# Altium footprint library Amin-Library.PcbLib: 601 footprints (part 29 of 38)
Each footprint in its own frame and in the unit in brackets; x right, y up, seen from the top. Pads: shape width x height; smd on the part's side, far side on the other; paste and mask are expansions set on the pad; w line width, h text height; cw(c..) or ccw(c..) is an arc to the next point about the centre after c.
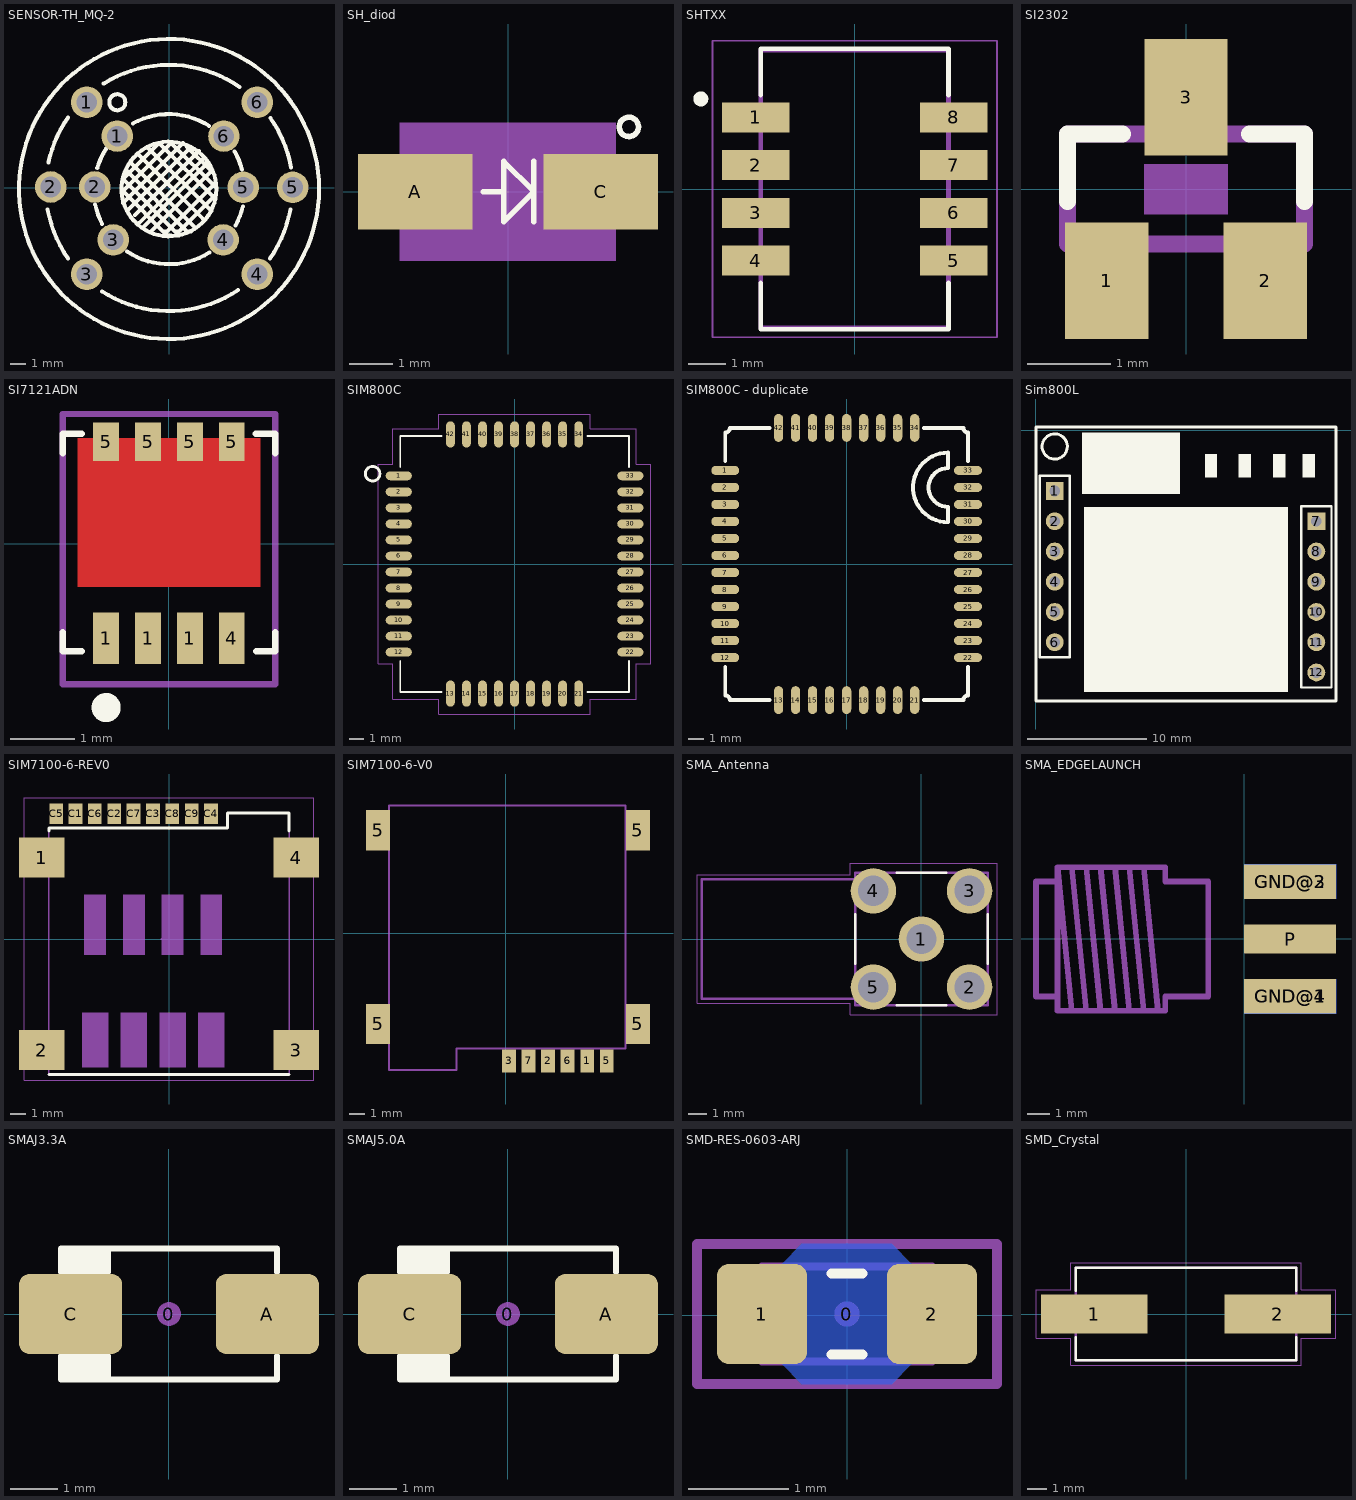
[diagram p28: the footprints below, top view; thin cyan lines are the x and y axes]

## SENSOR-TH_MQ-2 [mm]
pads (12):
  round 2 hole 1.3 paste-2539.97 mask+0.051: 1(-5.207,5.43) 1(-3.277,3.289) 2(-7.493,0.064) 2(-4.699,0.064) 3(-5.207,-5.461) 3(-3.531,-3.289) 4(3.429,-3.289) 4(5.588,-5.461) 5(4.699,0.038) 5(7.833,0.038) 6(3.48,3.289) 6(5.588,5.43)
Top Overlay:
  circle w0.254: c0,-0.064 r9.5
  circle w0.254: c-3.277,5.43 r0.508
  circle w0.254: c0,-0.064 r3
  lines w0.254: -7.682,-1.355 ccw(c0,0) -6.39,-4.474 ; -7.63,1.622 cw(c0,0) -6.39,4.474 ; -4.674,-1.041 ccw(c0,-0.063) -4.235,-2.269 ; -4.544,1.267 cw(c0,-0.064) -3.988,2.489 ; -4.248,-6.542 ccw(c0,0) 4.362,-6.466 ; -4.133,6.615 cw(c0,0) 4.474,6.389 ; -2.911,-0.963 0.899,2.847 ; -2.667,-4.013 ccw(c0,-0.063) 2.574,-4.074 ; -2.657,-1.471 1.407,2.593 ; -2.657,1.069 1.153,-2.741 1.407,-2.741 ; -2.403,1.577 1.661,-2.487 ; -2.276,4.093 cw(c0,-0.063) 2.54,3.937 ; -2.149,-1.725 1.915,2.339 ; -1.895,-2.233 2.169,1.831 ; -1.895,2.085 2.169,-1.979 ; -1.641,-2.487 2.423,1.577 ; -1.387,2.593 2.677,-1.471 ; -1.133,-2.741 2.677,1.069 1.153,2.593 ; -0.371,-2.741 -0.117,-2.741 2.931,0.307 ; 0.137,-2.995 -0.117,-2.995 -2.911,-0.201 0.137,2.847 2.931,0.053 ; 0.391,-2.741 0.645,-2.741 2.931,-0.455 ; 0.645,-2.995 -2.911,0.561 -0.625,2.847 2.931,-0.709 ; 4.161,2.297 cw(c0,-0.063) 4.623,1.168 ; 4.216,-2.362 ccw(c0,-0.063) 4.673,-1.17 ; 6.39,-4.474 ccw(c0,0) 7.682,-1.355 ; 6.43,4.421 cw(c0.041,-0.053) 7.722,1.301
3D body "User Library-MQ-5.step": height 31.06, standoff 8, extent -9.5,-9.551 9.5,9.424
3D body "User Library-socket-7.step": height 12.16, standoff -3.48, extent -8.363,-8.436 8.637,8.543

## SH_diod [mm]
pads (2):
  rect 2.65x1.75 smd: A(-2.15,0) C(2.15,0)
Top Overlay:
  circle w0.127: c2.8,1.5 r0.224
  lines w0.127: -0.573,0 -0.1,0 ; 0.6,-0.7 0.6,0 ; 0.6,0.7 0.6,0 ; -0.1,0 -0.1,-0.7 0.6,0 ; -0.1,0 -0.1,0.7 0.6,0
Mechanical 4:
  region: -0.501,0.9 0.5,0.9 0.5,-0.901 -0.501,-0.901
  region: -0.501,0.9 0.5,0.9 0.5,-0.901 -0.501,-0.901
  lines w0.127: -2.375,-1.475 -2.375,1.475 ; -2.375,-1.475 2.375,-1.475 ; -2.375,-1.475 -2.375,1.475 ; -2.375,-1.475 2.375,-1.475 ; -2.375,1.475 2.375,1.475 ; -2.375,1.475 2.375,1.475 ; 2.375,-1.475 2.375,1.475 ; 2.375,-1.475 2.375,1.475
Mechanical 16:
  region: -2.502,1.6 2.5,1.6 2.5,-1.601 -2.502,-1.601
3D body "User Library-DFLS220-POWERDI-123.step": height 1.16, standoff 0.01, extent -1.75,-0.89 2.15,0.89

## SHTXX [mm]
pads (8):
  rect 1.8x0.8 smd: 1(-2.64,1.905) 2(-2.64,0.635) 3(-2.64,-0.635) 4(-2.64,-1.905) 5(2.64,-1.905) 6(2.64,-0.635) 7(2.64,0.635) 8(2.64,1.905)
Top Overlay:
  circle w0.2: c-4.1,2.4 r0.1
  lines w0.127: -2.5,-2.5 -2.5,-3.735 2.5,-3.735 2.5,-2.5 ; -2.5,2.5 -2.5,3.735 2.5,3.735 2.5,2.5
Mechanical 4:
  lines w0.127: -2.5,-3.7 2.5,-3.7 ; -2.5,-3.7 -2.5,3.7 ; -2.5,-3.7 2.5,-3.7 ; -2.5,-3.7 -2.5,3.7 ; -2.5,3.7 2.5,3.7 ; -2.5,3.7 2.5,3.7 ; 2.5,-3.7 2.5,3.7 ; 2.5,-3.7 2.5,3.7
Mechanical 16:
  lines w0.05: -3.79,-3.95 -3.79,3.95 3.79,3.95 3.79,-3.95 -3.79,-3.95
3D body "User Library-SHT1x.step": height 2.36, standoff 0, extent -2.413,-3.735 2.517,3.735

## SI2302 [mm]
pads (3):
  rect 1x1.4 smd: 1(-0.95,-1.1) 2(0.95,-1.1) 3(0,1.1)
Top Overlay:
  lines w0.203: -1.422,-0.152 -1.422,0.66 -0.764,0.66 ; 0.764,0.66 1.422,0.66 1.422,-0.152
Mechanical 4:
  region: -0.5,0.3 0.5,0.3 0.5,-0.3 -0.5,-0.3
  region: -0.229,1.295 0.229,1.295 0.229,0.712 -0.229,0.712
  region: 0.711,-0.711 1.168,-0.711 1.168,-1.295 0.711,-1.295
  region: -1.169,-0.711 -0.711,-0.711 -0.711,-1.296 -1.169,-1.296
  region: -0.5,0.3 0.5,0.3 0.5,-0.3 -0.5,-0.3
  region: -0.229,1.295 0.229,1.295 0.229,0.712 -0.229,0.712
  region: 0.711,-0.711 1.168,-0.711 1.168,-1.295 0.711,-1.295
  region: -1.169,-0.711 -0.711,-0.711 -0.711,-1.296 -1.169,-1.296
  lines w0.203: -1.422,-0.66 1.422,-0.66 ; -1.422,-0.66 -1.422,0.66 ; -1.422,-0.66 1.422,-0.66 ; -1.422,-0.66 -1.422,0.66 ; -1.422,0.66 1.422,0.66 ; -1.422,0.66 1.422,0.66 ; 1.422,-0.66 1.422,0.66 ; 1.422,-0.66 1.422,0.66
3D body "CircuitWorks-SOT-23.step": height 1.11, standoff 0.01, extent -1.5,-1.377 1.5,1.123

## SI7121ADN [mm] "PDFN3X3-8"
pads (8):
  rect 0.4x0.8 smd: 1(-0.975,-1.465) 1(-0.325,-1.465) 1(0.325,-1.465) 4(0.975,-1.465)
  rect 0.4x0.6 smd: 5(-0.975,1.585) 5(-0.325,1.585) 5(0.325,1.585) 5(0.975,1.585)
Top Layer:
  region: -1.415,-0.665 1.415,-0.665 1.415,1.635 -1.415,1.635
Top Overlay:
  circle w0.25: c-0.975,-2.54 r0.1
  lines w0.1: -1.65,-1.368 -1.65,-1.668 -1.35,-1.668 ; -1.65,1.406 -1.65,1.706 -1.35,1.706 ; 1.35,1.706 1.65,1.706 1.65,1.406 ; 1.351,-1.668 1.651,-1.668 1.651,-1.368
Top Paste:
  region: 0.125,-0.664 1.415,-0.664 1.415,1.636 0.125,1.636
  region: -1.415,-0.665 -0.125,-0.665 -0.125,1.635 -1.415,1.635
Top Solder:
  region: 0.125,-0.664 1.415,-0.664 1.415,1.636 0.125,1.636
  region: -1.415,-0.665 -0.125,-0.665 -0.125,1.635 -1.415,1.635
Mechanical 15:
  lines w0.1: -1.65,-2.176 1.65,-2.176 1.65,2.015 -1.65,2.015 -1.65,-2.176
3D body "CSD17575Q3.STEP": height 1.1, standoff 0, extent -1.65,-1.65 1.65,1.65

## SIM800C [mm]
pads (42):
  oval 1.8x0.6 smd: 1(-7.95,6.05) 2(-7.95,4.95) 3(-7.95,3.85) 4(-7.95,2.75) 5(-7.95,1.65) 6(-7.95,0.55) 7(-7.95,-0.55) 8(-7.95,-1.65) 9(-7.95,-2.75) 10(-7.95,-3.85) 11(-7.95,-4.95) 12(-7.95,-6.05) 22(7.95,-6.05) 23(7.95,-4.95) 24(7.95,-3.85) 25(7.95,-2.75) 26(7.95,-1.65) 27(7.95,-0.55) 28(7.95,0.55) 29(7.95,1.65) 30(7.95,2.75) 31(7.95,3.85) 32(7.95,4.95) 33(7.95,6.05)
  oval 0.6x1.8 smd: 13(-4.4,-8.9) 14(-3.3,-8.9) 15(-2.2,-8.9) 16(-1.1,-8.9) 17(0,-8.9) 18(1.1,-8.9) 19(2.2,-8.9) 20(3.3,-8.9) 21(4.4,-8.9) 34(4.4,8.9) 35(3.3,8.9) 36(2.2,8.9) 37(1.1,8.9) 38(0,8.9) 39(-1.1,8.9) 40(-2.2,8.9) 41(-3.3,8.9) 42(-4.4,8.9)
Top Overlay:
  circle w0.2: c-9.75,6.2 r0.5
  lines w0.127: -7.85,-6.65 -7.85,-8.8 -5,-8.8 ; -7.85,6.65 -7.85,8.8 -5,8.8 ; 5,-8.8 7.85,-8.8 7.85,-6.65 ; 5,8.8 7.85,8.8 7.85,6.65
Mechanical 16:
  lines w0.05: -9.35,-6.85 -8.35,-6.85 -8.35,-9.3 -5.2,-9.3 -5.2,-10.3 5.2,-10.3 5.2,-9.3 8.35,-9.3 8.35,-6.85 9.35,-6.85 9.35,6.85 8.35,6.85 8.35,9.3 5.2,9.3 5.2,10.3 -5.2,10.3 -5.2,9.3 -8.35,9.3 -8.35,6.85 -9.35,6.85 -9.35,-6.85
3D body "User Library-SIM800C-1.STEP": height 2.34, standoff 0, extent -7.826,-8.8 7.874,8.8

## SIM800C - duplicate [mm]
pads (42):
  oval 1.8x0.6 smd: 1(-7.85,6.05) 2(-7.85,4.95) 3(-7.85,3.85) 4(-7.85,2.75) 5(-7.85,1.65) 6(-7.85,0.55) 7(-7.85,-0.55) 8(-7.85,-1.65) 9(-7.85,-2.75) 10(-7.85,-3.85) 11(-7.85,-4.95) 12(-7.85,-6.05) 22(7.85,-6.05) 23(7.85,-4.95) 24(7.85,-3.85) 25(7.85,-2.75) 26(7.85,-1.65) 27(7.85,-0.55) 28(7.85,0.55) 29(7.85,1.65) 30(7.85,2.75) 31(7.85,3.85) 32(7.85,4.95) 33(7.85,6.05)
  oval 0.6x1.8 smd: 13(-4.4,-8.8) 14(-3.3,-8.8) 15(-2.2,-8.8) 16(-1.1,-8.8) 17(0,-8.8) 18(1.1,-8.8) 19(2.2,-8.8) 20(3.3,-8.8) 21(4.4,-8.8) 34(4.4,8.8) 35(3.3,8.8) 36(2.2,8.8) 37(1.1,8.8) 38(0,8.8) 39(-1.1,8.8) 40(-2.2,8.8) 41(-3.3,8.8) 42(-4.4,8.8)
Top Overlay:
  lines w0.254: -7.85,-6.65 -7.85,-8.5 cw(c-7.85,-8.8) -7.55,-8.8 -5,-8.8 ; -7.85,6.65 -7.85,8.5 ccw(c-7.85,8.8) -7.55,8.8 -5,8.8 ; 5,-8.8 7.55,-8.8 cw(c7.85,-8.8) 7.85,-8.5 7.85,-6.65 ; 5,8.8 7.55,8.8 ccw(c7.85,8.8) 7.85,8.5 7.85,6.65 ; 6.55,2.7 cw(c6.55,4.95) 6.55,7.2 6.55,6.2 ccw(c6.55,4.95) 6.55,3.7 6.55,2.7
3D body "User Library-SIM800C-1.STEP": height 2.37, standoff 0.03, extent -7.85,-8.8 7.85,8.8

## Sim800L [mm]
pads (12):
  rect 1.5x1.5 hole 0.9: 1(1.6,-5.105) 7(23.571,-7.645)
  round 1.5 hole 0.9: 2(1.6,-7.645) 3(1.6,-10.185) 4(1.6,-12.725) 5(1.6,-15.265) 6(1.6,-17.805) 8(23.571,-10.185) 9(23.571,-12.725) 10(23.571,-15.265) 11(23.571,-17.805) 12(23.571,-20.345)
Top Overlay:
  rectangle: 14.199,-3.988 15.24,-1.981
  rectangle: 17.043,-3.988 18.085,-1.981
  rectangle: 19.939,-3.988 20.98,-1.981
  rectangle: 22.428,-3.988 23.47,-1.981
  rectangle: 4.039,-21.996 21.184,-6.452
  rectangle: 3.886,-5.359 12.116,-0.178
  lines w0.2: 0.33,-19.075 2.87,-19.075 2.87,-3.835 0.33,-3.835 0.33,-19.075 ; 22.301,-21.615 24.841,-21.615 24.841,-6.375 22.301,-6.375 22.301,-21.615
  lines w0.254: 2.657,-1.346 ccw(c1.6,-1.372) 2.658,-1.372 ; 0.025,-22.758 25.222,-22.758 25.222,0.279 0.025,0.279 0.025,-22.758
3D body "User Library-module_sim800l.STEP": height 10.1, standoff -2.4, extent 0.121,-22.997 25.121,0.137

## SIM7100-6-REV0 [mm]
pads (13):
  rect 3x2.61 smd: 1(-8.34,5.34) 2(-8.34,-7.29) 3(8.34,-7.29) 4(8.34,5.34)
  rect 0.9x1.35 smd: C1(-6.135,8.215) C2(-3.595,8.215) C3(-1.055,8.215) C4(2.755,8.215) C5(-7.405,8.215) C6(-4.865,8.215) C7(-2.325,8.215) C8(0.215,8.215) C9(1.485,8.215)
Top Overlay:
  lines w0.2: -7.875,-8.89 7.875,-8.89 ; -7.875,7.1 -7.875,7.27 3.84,7.27 3.84,8.28 7.875,8.28 7.875,7.1
Mechanical 4:
  lines w0.1: -7.875,-8.89 -7.875,7.27 ; -7.875,-8.89 7.875,-8.89 ; -7.875,-8.89 -7.875,7.27 ; -7.875,-8.89 7.875,-8.89 ; -7.875,7.27 3.84,7.27 ; -7.875,7.27 3.84,7.27 ; 3.84,7.27 3.84,8.28 ; 3.84,7.27 3.84,8.28 ; 3.84,8.28 7.875,8.28 ; 3.84,8.28 7.875,8.28 ; 7.875,-8.89 7.875,8.28 ; 7.875,-8.89 7.875,8.28
Mechanical 16:
  region: -5.695,-8.41 -3.995,-8.41 -3.995,-4.83 -5.695,-4.83
  region: -0.465,-1.03 0.935,-1.03 0.935,2.91 -0.465,2.91
  region: 1.925,-8.41 3.625,-8.41 3.625,-4.83 1.925,-4.83
  region: -5.545,-1.03 -4.145,-1.03 -4.145,2.91 -5.545,2.91
  region: 2.075,-1.03 3.475,-1.03 3.475,2.91 2.075,2.91
  region: -0.615,-8.41 1.085,-8.41 1.085,-4.83 -0.615,-4.83
  region: -3.155,-8.41 -1.455,-8.41 -1.455,-4.83 -3.155,-4.83
  region: -3.005,-1.03 -1.605,-1.03 -1.605,2.91 -3.005,2.91
  lines w0.05: -9.5,-9.25 -9.5,9.25 9.5,9.25 9.5,-9.25 -9.5,-9.25
  lines w0.1: -0.5,0 0.5,0 ; 0,-0.5 0,0.5

## SIM7100-6-V0 [mil]
pads (10):
  rect 35.43x59.06 smd: 1(208.57,-326.5) 2(108.57,-326.5) 3(8.57,-326.5) 5(258.57,-326.5) 6(158.57,-326.5) 7(58.57,-326.5)
  rect 61.42x102.76 smd: 5(-326.86,-232.01) 5(-326.86,264.06) 5(338.5,-232.01) 5(338.5,264.06)
Top Assembly:
  lines w5: -299.3,-350.12 -299.3,327.05 307,327.05 307,-295 -126.07,-295 -126.07,-350.12 -299.3,-350.12
3D body "User Library-MICRO 1_35 SIM (CD).step": height 60.97, standoff 4.21, extent -319.81,-337.52 329.8,340.03

## SMA_Antenna [mm]
pads (5):
  round 2.4 hole 1.6: 1(0,0) 2(2.54,-2.54) 3(2.54,2.54) 4(-2.54,2.54) 5(-2.54,-2.54)
Top Overlay:
  lines w0.127: -3.5,-1.3 -3.5,1.3 ; -1.3,-3.5 1.3,-3.5 ; -1.3,3.5 1.3,3.5 ; 3.5,-1.3 3.5,1.3
Mechanical 4:
  lines w0.127: -11.6,-3.15 -11.6,3.15 ; -11.6,-3.15 -3.5,-3.15 ; -11.6,-3.15 -11.6,3.15 ; -11.6,-3.15 -3.5,-3.15 ; -11.6,3.15 -3.5,3.15 ; -11.6,3.15 -3.5,3.15 ; -3.5,-3.5 3.5,-3.5 ; -3.5,-3.5 -3.5,-3.15 ; -3.5,-3.5 3.5,-3.5 ; -3.5,-3.5 -3.5,-3.15 ; -3.5,-3.15 -3.5,3.15 ; -3.5,-3.15 -3.5,3.15 ; -3.5,3.15 -3.5,3.5 ; -3.5,3.15 -3.5,3.5 ; -3.5,3.5 3.5,3.5 ; -3.5,3.5 3.5,3.5 ; 3.5,-3.5 3.5,3.5 ; 3.5,-3.5 3.5,3.5
Mechanical 16:
  lines w0.05: -11.85,-3.4 -11.85,3.4 -3.75,3.4 -3.75,3.99 3.99,3.99 3.99,-3.99 -3.75,-3.99 -3.75,-3.4 -11.85,-3.4
3D body "SMA-J-P-H-RA-TH1.stp": height 9.87, standoff -3.93, extent -11.6,-3.501 3.5,3.504

## SMA_EDGELAUNCH [mil]
pads (5):
  rect 160x60 smd paste-80: GND@1(80,-100) GND@2(80,100)
  rect 160x60 smd far side paste-80: GND@3(80,100) GND@4(80,-100)
  rect 160x50 smd paste-80: P(80,0)
Mechanical 8:
  region: 0,-12.5 0,12.5 125,12.5 125,-12.5
  region: 0,0 10,0 10,10 0,10
  region: 0,0 10,0 10,10 0,10
  lines w10: -150,-125 -175,125 ; -325,-100 -325,-125 -300,-125 ; -325,-100 -362.5,-100 -362.5,100 -325,100 ; -325,-100 -325,100 ; -325,100 -325,125 ; -325,125 -300,125 ; -325,125 -300,-125 ; -300,-125 -275,-125 ; -300,125 -275,125 ; -300,125 -275,-125 ; -275,-125 -250,-125 ; -275,125 -250,125 ; -275,125 -250,-125 ; -250,-125 -225,-125 ; -250,125 -225,125 ; -250,125 -225,-125 ; -225,-125 -200,-125 ; -225,125 -200,125 ; -225,125 -200,-125 ; -200,-125 -175,-125 ; -200,125 -175,125 ; -200,125 -175,-125 ; -175,-125 -137.5,-125 -137.5,-100 -62.5,-100 -62.5,100 -137.5,100 -137.5,125 -175,125
3D body "User Library-142-0711-301.STEP": height 325.01, standoff 0, extent -365,-129.99 160.01,121.97

## SMAJ3.3A [mm] "JEDEC DO214-AC. SMA"
pads (3):
  round 0.508 on Mech15: 0(0,0)
  rrect25% 2.2x1.7 smd: A(2.1,0) C(-2.1,0)
Top Overlay:
  region: -1.3,-0.9 -2.3,-0.9 -2.3,-1.4 -1.3,-1.4
  region: -1.3,1.4 -2.3,1.4 -2.3,0.9 -1.3,0.9
  lines w0.127: -1.3,-1.4 -1.3,-0.911 ; -1.3,-0.9 -2.3,-0.9 -2.3,-1.4 2.3,-1.4 2.3,-0.9 ; -1.3,1.4 -1.3,0.9 -2.3,0.9 -2.3,1.4 2.3,1.4 2.3,0.9
3D body "SW3dPS-DO-214AC SMA.STEP": height 2.42, standoff 0.02, extent -2.6,-1.3 2.6,1.3

## SMAJ5.0A [mm] "JEDEC DO214-AC. SMA"
pads (3):
  round 0.508 on Mech15: 0(0,0)
  rrect25% 2.2x1.7 smd: A(2.1,0) C(-2.1,0)
Top Overlay:
  region: -1.3,1.4 -2.3,1.4 -2.3,0.9 -1.3,0.9
  region: -1.3,-0.9 -2.3,-0.9 -2.3,-1.4 -1.3,-1.4
  lines w0.127: -1.3,-1.4 -1.3,-0.911 ; -1.3,-0.9 -2.3,-0.9 -2.3,-1.4 2.3,-1.4 2.3,-0.9 ; -1.3,1.4 -1.3,0.9 -2.3,0.9 -2.3,1.4 2.3,1.4 2.3,0.9
3D body "SW3dPS-DO-214AC SMA.STEP": height 2.42, standoff 0.02, extent -2.6,-1.3 2.6,1.3

## SMD-RES-0603-ARJ [mm]
pads (3):
  round 0.254 on Mech15: 0(-0.004,0.012)
  rrect25% 0.9x1 smd: 1(-0.854,0.012) 2(0.846,0.012)
Bottom Layer:
  pour cut-out: -0.654,-0.488 -0.454,-0.688 0.446,-0.688 0.646,-0.488 0.646,0.512 0.446,0.712 -0.454,0.712 -0.654,0.512
Top Overlay:
  lines w0.102: -0.156,-0.394 0.148,-0.394 ; -0.156,0.418 0.148,0.418
Mechanical 13:
  lines w0.076: -0.854,-0.463 0.846,-0.463 0.846,0.487 -0.854,0.487 -0.854,-0.463
Mechanical 15:
  lines w0.1: -1.504,-0.688 1.496,-0.688 1.496,0.712 -1.504,0.712 -1.504,-0.688
3D body "ESD Suppressor 0603 SMD.STEP": height 0.79, standoff -0.01, extent -0.854,-0.438 0.846,0.462

## SMD_Crystal [mm]
height 2
pads (2):
  rect 5.5x2 smd: 1(-4.75,0) 2(4.75,0)
Top Overlay:
  lines w0.127: -5.7,-1.2 -5.7,-2.4 5.7,-2.4 5.7,-1.2 ; -5.7,1.2 -5.7,2.4 5.7,2.4 5.7,1.2
Mechanical 4:
  lines w0.127: -5.7,-2.4 5.7,-2.4 ; -5.7,-2.4 -5.7,2.4 ; -5.7,-2.4 5.7,-2.4 ; -5.7,-2.4 -5.7,2.4 ; -5.7,2.4 5.7,2.4 ; -5.7,2.4 5.7,2.4 ; 5.7,-2.4 5.7,2.4 ; 5.7,-2.4 5.7,2.4
Mechanical 16:
  lines w0.05: -7.75,-1.25 -7.75,1.25 -5.95,1.25 -5.95,2.65 5.95,2.65 5.95,1.25 7.75,1.25 7.75,-1.25 5.95,-1.25 5.95,-2.65 -5.95,-2.65 -5.95,-1.25 -7.75,-1.25
3D body "User Library-HC49_SMD.step": height 4.3, standoff 0, extent -6.15,-2.25 6.15,2.25